# EAGLE library part 74LVC1G157GV-Q100H (library 74LVC1G157GV-Q100H)
NXP - 74LVC1G157GV-Q100H - MUX, SINGLE, 2 I/P, SC-74-6 Source: Datasheet <https://assets.nexperia.com/documents/data-sheet/74LVC1G157_Q100.pdf>
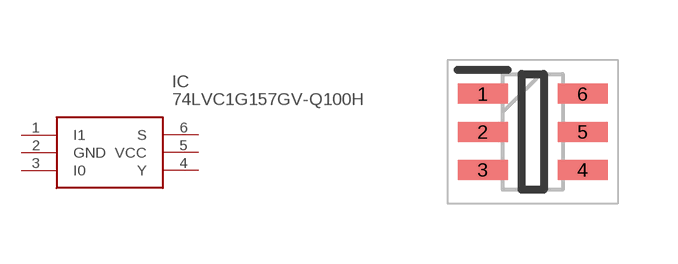
[diagram p0: symbol with the pads of SOT95P275X110-6N; footprint SOT95P275X110-6N]

Designator prefix IC

## 74LVC1G157GV-Q100H (Arrow_Part_Number: 74LVC1G157GV-Q100H; Arrow_Price-Stock: https://www.arrow.com/en/products/74lvc1g157gv-q100h/nexperia?utm_currency=USD&region=nac; Description: NXP - 74LVC1G157GV-Q100H - MUX, SINGLE, 2 I/P, SC-74-6; Height: 1.1mm; Manufacturer_Name: Nexperia; Manufacturer_Part_Number: 74LVC1G157GV-Q100H; Mouser_Part_Number: 771-74LVC1G157GVQ100; Mouser_Price-Stock: https://www.mouser.co.uk/ProductDetail/Nexperia/74LVC1G157GV-Q100H?qs=5XOdhvmYM0Nhlh6GR9ENlQ%3D%3D)  [SOT95P275X110-6N]
1  I1
2  GND
3  I0
4  Y
5  VCC
6  S

## Footprint SOT95P275X110-6N (pad centres in mm)
SC-74; TSOP6); 6 leads
smd 1.25 x 0.5: 1 -1.25,0.95; 2 -1.25,0; 3 -1.25,-0.95; 4 1.25,-0.95; 5 1.25,0; 6 1.25,0.95